# Altium schematic symbol library CL21A226MAYNNNE.SchLib: 1 symbol
Pins are listed as number, name and electrical type; pins without a type are passive.

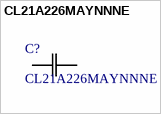
[diagram p0: symbol CL21A226MAYNNNE]

## CL21A226MAYNNNE
designator C?
Description; Manufacturer_Name: Samsung; Copyright: Copyright (C) 2025 Ultra Librarian. All rights reserved.; Manufacturer_Part_Number: CL21A226MAYNNNE
footprint CAP_CL_21_SAM
pins: 1, 2